# Altium footprint library PcbLib1_2023.PcbLib: 35 footprints (part 1 of 3)
Each footprint in its own frame and in the unit in brackets; x right, y up, seen from the top. Pads: shape width x height; smd on the part's side, far side on the other; paste and mask are expansions set on the pad; w line width, h text height; cw(c..) or ccw(c..) is an arc to the next point about the centre after c.
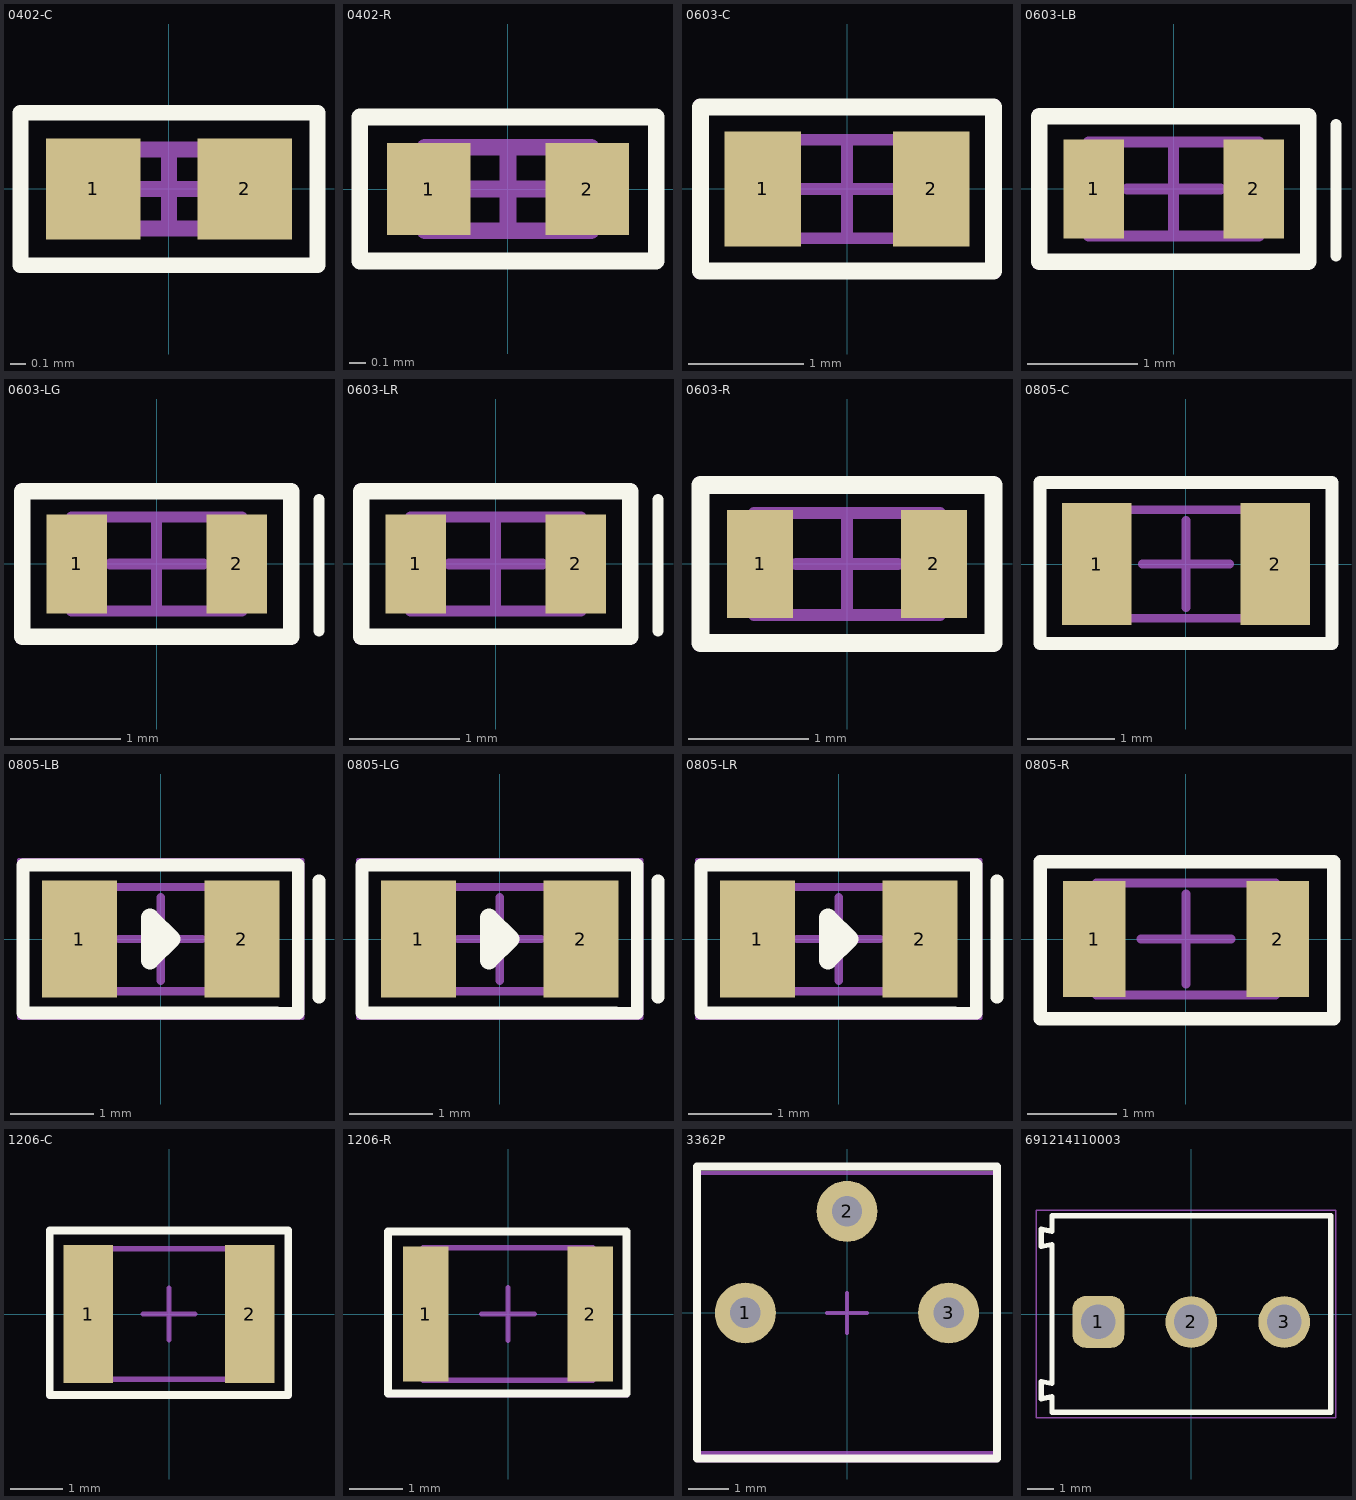
[diagram p0: the footprints below, top view; thin cyan lines are the x and y axes]

## 0402-C [mm] "Chip Capacitor, 2-Leads, Body 1,00x0,50mm, IPC Medium Density"
height 0.4
pads (2):
  rect 0.6x0.64 smd mask+0.05: 1(-0.48,0) 2(0.48,0)
Top Overlay:
  lines w0.1: -0.94,-0.483 0.94,-0.483 0.94,0.483 -0.94,0.483 -0.94,-0.483
Mechanical 13:
  lines w0.1: -0.5,-0.25 0.5,-0.25 0.5,0.25 -0.5,0.25 -0.5,-0.25
Mechanical 15:
  lines w0.05: -0.95,-0.5 0.95,-0.5 0.95,0.5 -0.95,0.5 -0.95,-0.5
  lines w0.1: -0.25,0 0.25,0 ; 0,-0.25 0,0.25
3D body "CAPC1005X04N.step": height 0.4, standoff 0, extent -0.5,-0.25 0.5,0.25

## 0402-R [mm] "Chip Resistor, 2-Leads, Body 1,00x0,50mm, IPC Medium Density"
height 0.4
pads (2):
  rect 0.5x0.55 smd paste+0 mask+0.05: 1(-0.475,0) 2(0.475,0)
Top Overlay:
  lines w0.1: -0.889,-0.432 -0.889,0.432 0.889,0.432 0.889,-0.432 -0.889,-0.432
Mechanical 13:
  lines w0.1: -0.5,-0.25 -0.5,0.25 0.5,0.25 0.5,-0.25 -0.5,-0.25
Mechanical 15:
  lines w0.05: -0.9,-0.45 -0.9,0.45 0.9,0.45 0.9,-0.45 -0.9,-0.45
  lines w0.1: -0.25,0 0.25,0 ; 0,-0.25 0,0.25
3D body "RESC1005X04N.step": height 0.4, standoff 0, extent -0.5,-0.25 0.5,0.25

## 0603-C [mm] "Chip Capacitor, 2-Leads, Body 1,55x0,85mm, IPC Medium Density"
height 0.45
pads (2):
  rect 0.66x1 smd: 1(-0.73,0) 2(0.73,0)
Top Overlay:
  lines w0.15: -1.27,-0.711 -1.27,0.711 1.27,0.711 1.27,-0.711 -1.27,-0.711
Mechanical 13:
  lines w0.1: -0.775,-0.425 0.775,-0.425 0.775,0.425 -0.775,0.425 -0.775,-0.425
Mechanical 15:
  lines w0.05: -1.3,-0.75 1.3,-0.75 1.3,0.75 -1.3,0.75 -1.3,-0.75
  lines w0.1: -0.425,0 0.425,0 ; 0,-0.425 0,0.425
3D body "CAPC1608X04N.step": height 0.45, standoff 0, extent -0.775,-0.425 0.775,0.425

## 0603-LB [mm]
height 0.98
pads (2):
  rect 0.55x0.9 smd: 1(-0.725,0) 2(0.725,0)
Top Overlay:
  lines w0.1: 1.473,-0.61 1.473,0.584
  lines w0.15: -1.219,-0.66 1.219,-0.66 1.219,0.66 -1.219,0.66 -1.219,-0.66
Mechanical 13:
  lines w0.1: -0.775,-0.425 -0.775,0.425 0.775,0.425 0.775,-0.425 -0.775,-0.425
Mechanical 15:
  lines w0.05: -1.25,-0.7 -1.25,0.7 1.25,0.7 1.25,-0.7 -1.25,-0.7
  lines w0.1: -0.425,0 0.425,0 ; 0,-0.425 0,0.425
3D body "LED Blue SMD 0603 Würth 150060BS55040.stp": height 0.4, standoff 0, extent -0.8,-0.4 0.8,0.4

## 0603-LG [mm]
height 0.98
pads (2):
  rect 0.55x0.9 smd: 1(-0.725,0) 2(0.725,0)
Top Overlay:
  lines w0.1: 1.473,-0.61 1.473,0.584
  lines w0.15: -1.219,-0.66 -1.219,0.66 1.219,0.66 1.219,-0.66 -1.219,-0.66
Mechanical 13:
  lines w0.1: -0.775,-0.425 0.775,-0.425 0.775,0.425 -0.775,0.425 -0.775,-0.425
Mechanical 15:
  lines w0.05: -1.25,-0.7 1.25,-0.7 1.25,0.7 -1.25,0.7 -1.25,-0.7
  lines w0.1: -0.425,0 0.425,0 ; 0,-0.425 0,0.425
3D body "LED Green SMD 0603 Würth 150060BS55040.stp": height 0.4, standoff 0, extent -0.8,-0.4 0.8,0.4

## 0603-LR [mm]
height 0.98
pads (2):
  rect 0.55x0.9 smd: 1(-0.725,0) 2(0.725,0)
Top Overlay:
  lines w0.1: 1.473,-0.61 1.473,0.584
  lines w0.15: -1.219,-0.66 1.219,-0.66 1.219,0.66 -1.219,0.66 -1.219,-0.66
Mechanical 13:
  lines w0.1: -0.775,-0.425 -0.775,0.425 0.775,0.425 0.775,-0.425 -0.775,-0.425
Mechanical 15:
  lines w0.05: -1.25,-0.7 -1.25,0.7 1.25,0.7 1.25,-0.7 -1.25,-0.7
  lines w0.1: -0.425,0 0.425,0 ; 0,-0.425 0,0.425
3D body "LED Red SMD 0603 Würth 150060SS55040.stp": height 0.4, standoff 0, extent -0.8,-0.4 0.8,0.4

## 0603-R [mm] "Chip Resistor, 2-Leads, Body 1,55x0,85mm, IPC Medium Density"
height 0.45
pads (2):
  rect 0.55x0.9 smd: 1(-0.725,0) 2(0.725,0)
Top Overlay:
  lines w0.15: -1.219,-0.66 1.219,-0.66 1.219,0.66 -1.219,0.66 -1.219,-0.66
Mechanical 13:
  lines w0.1: -0.775,-0.425 -0.775,0.425 0.775,0.425 0.775,-0.425 -0.775,-0.425
Mechanical 15:
  lines w0.05: -1.25,-0.7 -1.25,0.7 1.25,0.7 1.25,-0.7 -1.25,-0.7
  lines w0.1: -0.425,0 0.425,0 ; 0,-0.425 0,0.425
3D body "RESC1608X04N.step": height 0.45, standoff 0, extent -0.775,-0.425 0.775,0.425

## 0805-C [mm] "Chip Capacitor, 2-Leads, Body 2,00x1,25mm, IPC Medium Density"
height 0.45
pads (2):
  rect 0.8x1.4 smd: 1(-1.025,0) 2(1.025,0)
Top Overlay:
  lines w0.15: -1.676,-0.914 -1.676,0.94 1.676,0.94 1.676,-0.914 -1.676,-0.914
Mechanical 13:
  lines w0.1: -1,-0.625 1,-0.625 1,0.625 -1,0.625 -1,-0.625
Mechanical 15:
  lines w0.05: -1.7,-0.95 1.7,-0.95 1.7,0.95 -1.7,0.95 -1.7,-0.95
  lines w0.1: -0.5,0 0.5,0 ; 0,-0.5 0,0.5
3D body "CAPC2012X04N.step": height 0.45, standoff 0, extent -1,-0.625 1,0.625

## 0805-LB [mm] "Chip Diode, 2-Leads, Body 2,00x1,25mm, IPC Medium Density, LED, Green"
height 1.1
pads (2):
  rect 0.9x1.4 smd: 1(-0.975,0) 2(0.975,0)
Top Overlay:
  lines w0.152: 1.9,-0.7 1.9,0.7 ; -1.651,-0.889 -1.651,0.889 1.651,0.889 1.651,-0.635 1.651,-0.889 1.397,-0.889 -1.524,-0.889 -1.651,-0.889
  lines w0.22: -0.127,-0.254 0.127,0 -0.127,0.254 -0.127,-0.254
Mechanical 13:
  lines w0.1: -1,-0.625 1,-0.625 1,0.625 -1,0.625 -1,-0.625
Mechanical 15:
  lines w0.05: -1.7,-0.95 1.7,-0.95 1.7,0.95 -1.7,0.95 -1.7,-0.95
  lines w0.1: -0.5,0 0.5,0 ; 0,-0.5 0,0.5
3D body "0805 LED blue.step": height 1.1, standoff -0.01, extent -1,-0.625 1,0.625

## 0805-LG [mm] "Chip Diode, 2-Leads, Body 2,00x1,25mm, IPC Medium Density, LED, Green"
height 1.1
pads (2):
  rect 0.9x1.4 smd: 1(-0.975,0) 2(0.975,0)
Top Overlay:
  lines w0.152: 1.9,-0.7 1.9,0.7 ; -1.651,-0.889 -1.651,0.889 1.651,0.889 1.651,-0.635 1.651,-0.889 1.397,-0.889 -1.524,-0.889 -1.651,-0.889
  lines w0.22: -0.127,-0.254 0.127,0 -0.127,0.254 -0.127,-0.254
Mechanical 13:
  lines w0.1: -1,-0.625 1,-0.625 1,0.625 -1,0.625 -1,-0.625
Mechanical 15:
  lines w0.05: -1.7,-0.95 1.7,-0.95 1.7,0.95 -1.7,0.95 -1.7,-0.95
  lines w0.1: -0.5,0 0.5,0 ; 0,-0.5 0,0.5
3D body "0805 LED GREEN.step": height 1.1, standoff -0.01, extent -1,-0.625 1,0.625

## 0805-LR [mm] "Chip Diode, 2-Leads, Body 2,00x1,25mm, IPC Medium Density, LED, Green"
height 1.1
pads (2):
  rect 0.9x1.4 smd: 1(-0.975,0) 2(0.975,0)
Top Overlay:
  lines w0.152: 1.9,-0.7 1.9,0.7 ; -1.651,-0.889 -1.651,0.889 1.651,0.889 1.651,-0.739 1.651,-0.889 1.397,-0.889 -1.524,-0.889 -1.651,-0.889
  lines w0.22: -0.127,-0.254 0.127,0 -0.127,0.254 -0.127,-0.254
Mechanical 13:
  lines w0.1: -1,-0.625 1,-0.625 1,0.625 -1,0.625 -1,-0.625
Mechanical 15:
  lines w0.05: -1.7,-0.95 1.7,-0.95 1.7,0.95 -1.7,0.95 -1.7,-0.95
  lines w0.1: -0.5,0 0.5,0 ; 0,-0.5 0,0.5
3D body "0805-LED-Red.step": height 1.1, standoff -0.01, extent -1,-0.625 1,0.625

## 0805-R [mm] "Chip Resistor, 2-Leads, Body 2,00x1,25mm, IPC Medium Density"
height 0.45
pads (2):
  rect 0.7x1.3 smd: 1(-1.025,0) 2(1.025,0)
Top Overlay:
  lines w0.15: -1.626,-0.889 1.651,-0.889 1.651,0.864 -1.626,0.864 -1.626,-0.889
Mechanical 13:
  lines w0.1: -1,-0.625 -1,0.625 1,0.625 1,-0.625 -1,-0.625
Mechanical 15:
  lines w0.05: -1.65,-0.9 -1.65,0.9 1.65,0.9 1.65,-0.9 -1.65,-0.9
  lines w0.1: -0.5,0 0.5,0 ; 0,-0.5 0,0.5
3D body "RESC2012X04N.step": height 0.45, standoff 0, extent -1,-0.625 1,0.625

## 1206-C [mm] "Chip Capacitor, 2-Leads, Body 3,20x2,50mm, IPC Medium Density"
height 0.55
pads (2):
  rect 0.95x2.65 smd: 1(-1.55,0) 2(1.55,0)
Top Overlay:
  lines w0.15: -2.286,-1.549 -2.286,1.6 2.286,1.6 2.286,-1.549 -2.286,-1.549
Mechanical 13:
  lines w0.1: -1.6,-1.25 1.6,-1.25 1.6,1.25 -1.6,1.25 -1.6,-1.25
Mechanical 15:
  lines w0.05: -2.3,-1.6 2.3,-1.6 2.3,1.6 -2.3,1.6 -2.3,-1.6
  lines w0.1: -0.5,0 0.5,0 ; 0,-0.5 0,0.5
3D body "CAPC3225X06N.step": height 0.55, standoff 0, extent -1.6,-1.25 1.6,1.25

## 1206-R [mm] "Chip Resistor, 2-Leads, Body 3,20x2,50mm, IPC Medium Density"
height 0.55
pads (2):
  rect 0.85x2.55 smd: 1(-1.55,0) 2(1.55,0)
Top Overlay:
  lines w0.15: -2.261,-1.499 -2.261,1.549 2.235,1.549 2.235,-1.499 -2.261,-1.499
Mechanical 13:
  lines w0.1: -1.6,-1.25 -1.6,1.25 1.6,1.25 1.6,-1.25 -1.6,-1.25
Mechanical 15:
  lines w0.05: -2.25,-1.55 -2.25,1.55 2.25,1.55 2.25,-1.55 -2.25,-1.55
  lines w0.1: -0.5,0 0.5,0 ; 0,-0.5 0,0.5
3D body "RESC3225X06N.step": height 0.55, standoff 0, extent -1.6,-1.25 1.6,1.25

## 3362P [mil] "3362 - 1/4 ” Square Trimpot® Trimming Potentiometer"
height 185.04
pads (3):
  round 60 hole 30: 1(-100,0) 2(0,100) 3(100,0)
Top Overlay:
  lines w7.87: -147.64,-143 -147.64,144 136,144 147.64,144 147.64,-143 -147.64,-143
Mechanical 13:
  lines w3.94: -147.64,-137.6 147.64,-137.6 147.64,137.6 -147.64,137.6 -147.64,-137.6
Mechanical 15:
  lines w1.97: -147.64,-146 -147.64,144 147.64,144 147.64,-146 -147.64,-146
  lines w3.94: -19.68,0 19.68,0 ; 0,-19.68 0,19.68
3D body "pot-3362p.step": height 188.78, standoff -102.36, extent -129.92,-129.92 129.93,129.92

## 691214110003 [mm] "3.50 mm Horizontal Entry Modular, 3p"
height 8.5
pads (3):
  rrect50% 1.95x1.95 hole 1.3: 1(-3.5,-0.3)
  round 1.95 hole 1.3: 2(0,-0.3) 3(3.5,-0.3)
Top Overlay:
  lines w0.2: -5.65,-3.195 -5.65,-2.545 -5.25,-2.62 -5.25,2.62 -5.65,2.545 -5.65,3.195 -5.25,3.12 -5.25,3.7 5.25,3.7 5.25,-3.7 -5.25,-3.7 -5.25,-3.12 -5.65,-3.195
Top 3D Body:
  lines w0.1: -5.65,-3.195 -5.65,-2.545 -5.25,-2.62 -5.25,2.62 -5.65,2.545 -5.65,3.195 -5.25,3.12 -5.25,3.7 5.25,3.7 5.25,-3.7 -5.25,-3.7 -5.25,-3.12 -5.65,-3.195
Top Courtyard:
  lines w0.05: -5.85,-3.9 -5.85,3.9 5.45,3.9 5.45,-3.9 -5.85,-3.9
Top Designator:
  text ".Designator" at -7.498,-0.5 h1.5
Top Component Outline:
  lines w0.1: -5.65,-3.195 -5.25,-3.12 -5.25,-3.7 5.25,-3.7 5.25,3.7 -5.25,3.7 -5.25,3.12 -5.65,3.195 -5.65,2.545 -5.25,2.62 -5.25,-2.62 -5.65,-2.545 -5.65,-3.195
Top Component Center:
  lines w0.05: -0.5,0 0.5,0 ; 0,-0.5 0,0.5
3D body "691214110003.stp": height 8.55, standoff -3.65, extent -5.7,-3.7 5.25,3.7